# Altium footprint library IC.PcbLib: 204 footprints (part 8 of 13)
Each footprint in its own frame and in the unit in brackets; x right, y up, seen from the top. Pads: shape width x height; smd on the part's side, far side on the other; paste and mask are expansions set on the pad; w line width, h text height; cw(c..) or ccw(c..) is an arc to the next point about the centre after c.
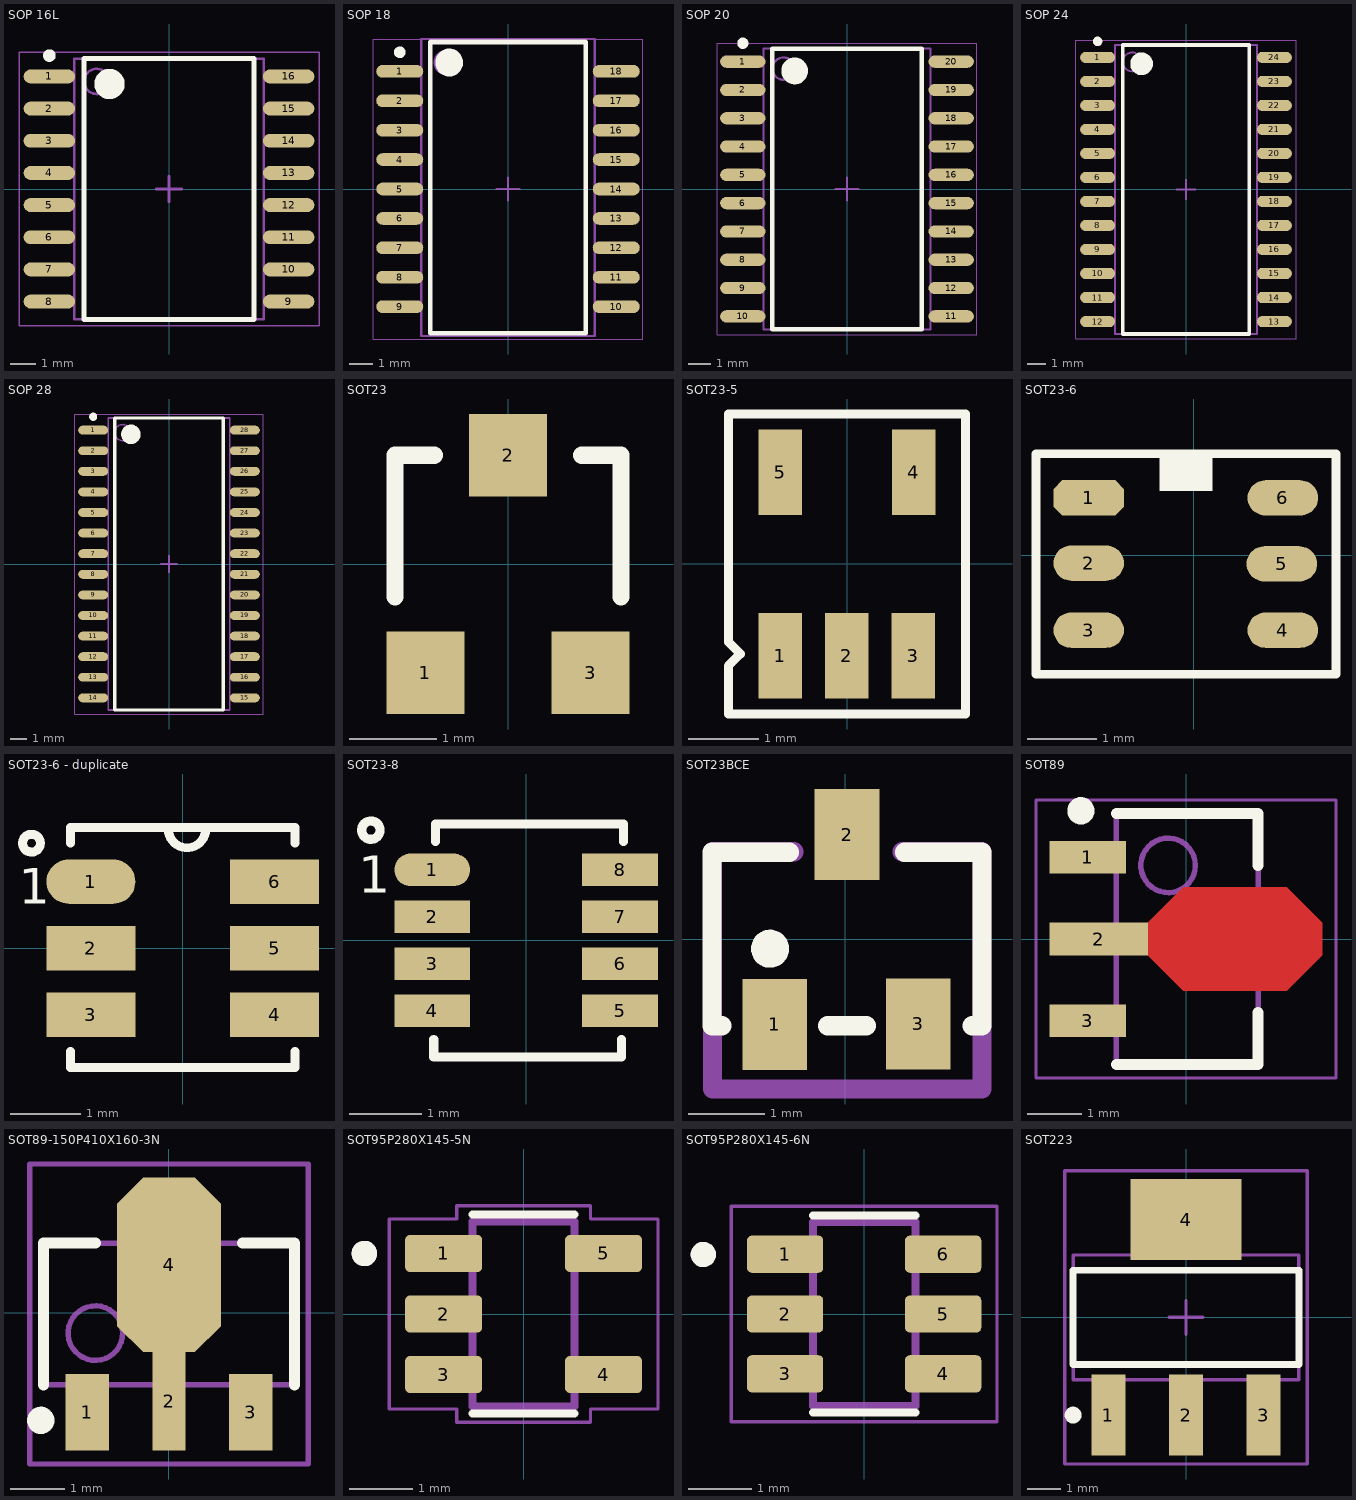
[diagram p7: the footprints below, top view; thin cyan lines are the x and y axes]

## SOP 16L [mm] "SOIC, 16-Leads, Body 10.30x7.50mm, Pitch 1.27mm, IPC Medium Density"
height 2.4
pads (16):
  oval 2.032x0.55 smd: 1(-4.725,4.445) 2(-4.725,3.175) 3(-4.725,1.905) 4(-4.725,0.635) 5(-4.725,-0.635) 6(-4.725,-1.905) 7(-4.725,-3.175) 8(-4.725,-4.445) 9(4.725,-4.445) 10(4.725,-3.175) 11(4.725,-1.905) 12(4.725,-0.635) 13(4.725,0.635) 14(4.725,1.905) 15(4.725,3.175) 16(4.725,4.445)
Top Overlay:
  circle w0.25: c-4.725,5.27 r0.125
  circle w0.6: c-2.35,4.15 r0.3
  lines w0.2: -3.35,-5.15 -3.35,5.15 3.35,5.15 3.35,-5.15 -3.35,-5.15
Mechanical 13:
  circle w0.1: c-2.85,4.25 r0.5
  lines w0.1: -3.75,-5.15 -3.75,5.15 3.75,5.15 3.75,-5.15 -3.75,-5.15
Mechanical 15:
  lines w0.05: -5.925,-5.4 -5.925,5.4 5.925,5.4 5.925,-5.4 -5.925,-5.4
  lines w0.1: -0.5,0 0.5,0 ; 0,-0.5 0,0.5
3D body "User Library-SO-16W.STEP": height 2.48, standoff 0, extent -5.155,-5.165 5.155,5.165

## SOP 18 [mm] "SOIC, 18-Leads, Body 11.50x7.50mm, Pitch 1.27mm, IPC Medium Density"
height 2.3
pads (18):
  oval 2.032x0.55 smd: 1(-4.675,5.08) 2(-4.675,3.81) 3(-4.675,2.54) 4(-4.675,1.27) 5(-4.675,0) 6(-4.675,-1.27) 7(-4.675,-2.54) 8(-4.675,-3.81) 9(-4.675,-5.08) 10(4.675,-5.08) 11(4.675,-3.81) 12(4.675,-2.54) 13(4.675,-1.27) 14(4.675,0) 15(4.675,1.27) 16(4.675,2.54) 17(4.675,3.81) 18(4.675,5.08)
Top Overlay:
  circle w0.25: c-4.675,5.905 r0.125
  circle w0.6: c-2.54,5.461 r0.3
  lines w0.2: -3.35,-6.223 -3.35,6.35 3.35,6.35 3.35,-6.223 -3.35,-6.223
Mechanical 13:
  circle w0.1: c-2.667,5.461 r0.5
  lines w0.1: -3.75,-6.35 -3.75,6.477 3.75,6.477 3.75,-6.35 -3.75,-6.35
Mechanical 15:
  lines w0.05: -5.825,-6.477 -5.825,6.477 5.825,6.477 5.825,-6.477 -5.825,-6.477
  lines w0.1: -0.5,0 0.5,0 ; 0,-0.5 0,0.5
3D body "User Library-SOIC18-300.step": height 2.7, standoff 0.05, extent -5.15,-5.765 5.15,5.765

## SOP 20 [mm] "SOIC, 20-Leads, Body 12.60x7.50mm, Pitch 1.27mm, IPC Medium Density"
height 2.65
pads (20):
  oval 2.032x0.55 smd: 1(-4.675,5.715) 2(-4.675,4.445) 3(-4.675,3.175) 4(-4.675,1.905) 5(-4.675,0.635) 6(-4.675,-0.635) 7(-4.675,-1.905) 8(-4.675,-3.175) 9(-4.675,-4.445) 10(-4.675,-5.715) 11(4.675,-5.715) 12(4.675,-4.445) 13(4.675,-3.175) 14(4.675,-1.905) 15(4.675,-0.635) 16(4.675,0.635) 17(4.675,1.905) 18(4.675,3.175) 19(4.675,4.445) 20(4.675,5.715)
Top Overlay:
  circle w0.6: c-2.35,5.3 r0.3
  circle w0.25: c-4.675,6.54 r0.125
  lines w0.2: -3.35,-6.3 3.35,-6.3 3.35,6.3 -3.35,6.3 -3.35,-6.3
Mechanical 13:
  circle w0.1: c-2.85,5.4 r0.5
  lines w0.1: -3.75,-6.3 3.75,-6.3 3.75,6.3 -3.75,6.3 -3.75,-6.3
Mechanical 15:
  lines w0.05: -5.825,-6.55 5.825,-6.55 5.825,6.55 -5.825,6.55 -5.825,-6.55
  lines w0.1: -0.5,0 0.5,0 ; 0,-0.5 0,0.5
3D body "User Library-SOIC20.step": height 2.25, standoff 0.01, extent -5.067,-6.3 5.067,6.3

## SOP 24 [mm] "SOIC, 24-Leads, Body 15.30x7.50mm, Pitch 1.27mm, IPC Medium Density"
height 2.3
pads (24):
  oval 1.85x0.6 smd: 1(-4.675,6.985) 2(-4.675,5.715) 3(-4.675,4.445) 4(-4.675,3.175) 5(-4.675,1.905) 6(-4.675,0.635) 7(-4.675,-0.635) 8(-4.675,-1.905) 9(-4.675,-3.175) 10(-4.675,-4.445) 11(-4.675,-5.715) 12(-4.675,-6.985) 13(4.675,-6.985) 14(4.675,-5.715) 15(4.675,-4.445) 16(4.675,-3.175) 17(4.675,-1.905) 18(4.675,-0.635) 19(4.675,0.635) 20(4.675,1.905) 21(4.675,3.175) 22(4.675,4.445) 23(4.675,5.715) 24(4.675,6.985)
Top Overlay:
  circle w0.25: c-4.675,7.835 r0.125
  circle w0.6: c-2.35,6.65 r0.3
  lines w0.2: -3.35,-7.65 -3.35,7.65 3.35,7.65 3.35,-7.65 -3.35,-7.65
Mechanical 13:
  circle w0.1: c-2.85,6.75 r0.5
  lines w0.1: -3.75,-7.65 -3.75,7.65 3.75,7.65 3.75,-7.65 -3.75,-7.65
Mechanical 15:
  lines w0.05: -5.825,-7.9 -5.825,7.9 5.825,7.9 5.825,-7.9 -5.825,-7.9
  lines w0.1: -0.5,0 0.5,0 ; 0,-0.5 0,0.5
3D body "User Library-SOIC_24.STEP": height 2.6, standoff 0, extent -5.2,-7.835 5.2,7.565

## SOP 28 [mm] "SOIC, 28-Leads, Body 18.00x7.50mm, Pitch 1.27mm, IPC Medium Density"
height 2.3
pads (28):
  oval 1.85x0.55 smd: 1(-4.675,8.255) 2(-4.675,6.985) 3(-4.675,5.715) 4(-4.675,4.445) 5(-4.675,3.175) 6(-4.675,1.905) 7(-4.675,0.635) 8(-4.675,-0.635) 9(-4.675,-1.905) 10(-4.675,-3.175) 11(-4.675,-4.445) 12(-4.675,-5.715) 13(-4.675,-6.985) 14(-4.675,-8.255) 15(4.675,-8.255) 16(4.675,-6.985) 17(4.675,-5.715) 18(4.675,-4.445) 19(4.675,-3.175) 20(4.675,-1.905) 21(4.675,-0.635) 22(4.675,0.635) 23(4.675,1.905) 24(4.675,3.175) 25(4.675,4.445) 26(4.675,5.715) 27(4.675,6.985) 28(4.675,8.255)
Top Overlay:
  circle w0.6: c-2.35,8 r0.3
  circle w0.25: c-4.675,9.08 r0.125
  lines w0.2: -3.35,-9 3.35,-9 3.35,9 -3.35,9 -3.35,-9
Mechanical 13:
  circle w0.1: c-2.85,8.1 r0.5
  lines w0.1: -3.75,-9 3.75,-9 3.75,9 -3.75,9 -3.75,-9
Mechanical 15:
  lines w0.05: -5.825,-9.25 5.825,-9.25 5.825,9.25 -5.825,9.25 -5.825,-9.25
  lines w0.1: -0.5,0 0.5,0 ; 0,-0.5 0,0.5
3D body "User Library-28-SOIC.step": height 2.73, standoff -0.03, extent -5.023,-9.01 5.277,8.89

## SOT23 [mm] "SOT23"
height 1.1
pads (3):
  rect 0.9x0.95 smd: 1(-0.95,-1.25) 2(0,1.25)
  rect 0.9x0.95 smd mask+0: 3(0.95,-1.25)
Top Overlay:
  lines w0.2: -1.3,-0.375 -1.3,1.25 -0.85,1.25 ; 0.85,1.25 1.3,1.25 1.3,-0.375
3D body "SW3DPS-SOT-23-DEFAULT.STEP": height 1.06, standoff -0.04, extent -1.524,-1.23 1.476,1.27

## SOT23-5 [mm] "CASE: SOT"
height 1.1
pads (5):
  rect 0.62x1.22 smd mask+0.076: 1(-0.953,-1.31) 2(-0.003,-1.31) 3(0.947,-1.31) 4(0.952,1.31) 5(-0.953,1.31)
Top Overlay:
  lines w0.127: -1.689,-2.138 -1.689,-1.452 -1.519,-1.281 -1.689,-1.111 -1.689,2.137 1.689,2.137 1.689,-2.138 -1.689,-2.138
3D body "User Library-SOT-23-5.STEP": height 1.41, standoff -0.05, extent -1.5,-1.5 1.5,1.5

## SOT23-6 [mil]
pads (6):
  oct 40x20 smd: 1(-59.41,32.4)
  oval 40x20 smd: 2(-59.41,-4.6) 3(-59.41,-42.6) 4(50.59,-42.6) 5(50,-5) 6(50.59,32.4)
Top Overlay:
  rectangle: -19.41,36.34 10.59,56.02
  lines w5: -89.29,43.42 -89.29,44.42 ; -89.29,47.42 -89.29,57.42 ; -75.29,57.42 -73.29,57.42 ; -74.29,57.42 -89.29,57.42 ; -89.29,57.42 -89.29,-67.58 80.71,-67.58 80.71,57.42 -89.29,57.42
3D body "User Library-SOT23-6.step": height 51.18, standoff 0, extent -64.05,-64.05 54.06,54.06

## SOT23-6 - duplicate [mm] "CASE: SOT"
height 1.45
pads (6):
  oval 1.27x0.635 smd mask+0.076: 1(-1.31,0.95)
  rect 1.27x0.635 smd mask+0.076: 2(-1.31,0) 3(-1.31,-0.95) 4(1.31,-0.95) 5(1.31,0) 6(1.31,0.95)
Top Overlay:
  circle w0.127: c-2.159,1.499 r0.127
  lines w0.127: -1.6,-1.473 -1.6,-1.704 1.6,-1.704 1.6,-1.473 ; -1.6,1.499 -1.6,1.725 1.6,1.725 1.6,1.499 ; -0.206,1.7 ccw(c0.061,1.7) 0.328,1.7
  text "1" at -2.337,0.635 h0.51
3D body "User Library-SOT-23-6-1.STEP": height 1.41, standoff -0.05, extent -1.5,-1.5 1.5,1.5

## SOT23-8 [mm] "Case-SOT"
height 1.45
pads (8):
  oval 1.05x0.45 smd mask+0.076: 1(-1.3,0.975)
  rect 1.05x0.45 smd mask+0.076: 2(-1.3,0.325) 3(-1.3,-0.325) 4(-1.3,-0.975) 5(1.3,-0.975) 6(1.3,-0.325) 7(1.3,0.325) 8(1.3,0.975)
Top Overlay:
  circle w0.127: c-2.149,1.524 r0.127
  lines w0.127: -1.279,-1.372 -1.279,-1.616 1.321,-1.616 1.321,-1.372 ; -1.254,1.366 -1.254,1.61 1.346,1.61 1.346,1.366
  text "1" at -2.327,0.66 h0.51
3D body "User Library-SOT-23-8-Thin.step": height 1.1, standoff 0, extent -1.454,-1.465 1.496,1.485

## SOT23BCE [mm]
pads (3):
  rect 0.85x1.2 smd: 1(-0.927,-1.123) 2(0.023,1.377) 3(0.963,-1.118)
Top Overlay:
  circle w0.25: c-0.991,-0.127 r0.125
  lines w0.254: -1.628,-1.143 -1.755,-1.143 -1.755,1.143 -0.739,1.143 ; -0.231,-1.143 0.277,-1.143 ; 0.785,1.143 1.801,1.143 1.801,-1.143 1.674,-1.143
Mechanical 13:
  lines w0.254: -0.675,1.15 -1.75,1.15 -1.75,-1.975 1.8,-1.975 1.8,1.15 0.75,1.15
  text "E" at 0.9,-0.25 h0.64
  text "C" at -0.1,0 h0.64
3D body "SW3DPS-SOT-23-DEFAULT.STEP": height 1.06, standoff -0.04, extent -1.477,-1.174 1.523,1.326

## SOT89 [mm] "SOT89, 3-Leads, Body 4.55x2.55mm, Pitch 1.50mm, Lead Span 4.1mm, IPC Medium Density"
height 1.5
pads (3):
  rect 1.4x0.6 smd: 1(-1.8,1.5) 3(-1.8,-1.5)
  rect 1.8x0.6 smd: 2(-1.6,0)
Top Layer:
  region: -0.7,0.3 -0.05,0.95 1.85,0.95 2.5,0.3 2.5,-0.3 1.85,-0.95 -0.05,-0.95 -0.7,-0.3
Top Overlay:
  circle w0.25: c-1.927,2.35 r0.125
  lines w0.2: -1.278,-2.3 1.322,-2.3 1.322,-1.35 ; -1.278,2.3 1.322,2.3 1.322,1.35
Mechanical 13:
  circle w0.1: c-0.327,1.35 r0.5
  lines w0.1: -1.278,-2.3 1.322,-2.3 1.322,2.3 -1.278,2.3 -1.278,-2.3
Mechanical 15:
  lines w0.05: -2.75,-2.55 2.75,-2.55 2.75,2.55 -2.75,2.55 -2.75,-2.55
  lines w0.1: -0.477,0 0.523,0 ; 0.022,-0.5 0.022,0.5
3D body "CircuitWorks-SOT89.step": height 1.5, standoff 0, extent -2.159,-2.25 1.841,2.25

## SOT89-150P410X160-3N [mm]
pads (4):
  rect 0.8x1.4 smd: 1(-1.5,-1.825) 3(1.5,-1.825)
  rect 0.6x1.8 smd: 2(0,-1.625)
  oct 1.9x3.2 smd: 4(0,0.875)
Top Overlay:
  circle w0.25: c-2.35,-1.975 r0.125
  lines w0.2: -2.3,-1.325 -2.3,1.275 -1.35,1.275 ; 1.35,1.275 2.3,1.275 2.3,-1.325
Mechanical 13:
  circle w0.1: c-1.35,-0.375 r0.5
  lines w0.1: -2.3,-1.325 2.3,-1.325 2.3,1.275 -2.3,1.275 -2.3,-1.325
Mechanical 15:
  lines w0.1: -0.5,-0.025 0.5,-0.025 ; 0,-0.525 0,0.475 ; -2.55,-2.775 2.55,-2.775 2.55,2.725 -2.55,2.725 -2.55,-2.775
3D body "sot89.step": height 1.4, standoff 0, extent -2.25,-2.21 2.25,1.725

## SOT95P280X145-5N [mm]
height 1.45
pads (5):
  rrect25% 1.21x0.58 smd paste+0 mask+0.102: 1(-1.255,0.95) 2(-1.255,0) 3(-1.255,-0.95) 4(1.255,-0.95) 5(1.255,0.95)
Top Overlay:
  circle w0.2: c-2.5,0.95 r0.1
  lines w0.127: -0.8,-1.56 0.8,-1.56 ; -0.8,1.56 0.8,1.56
Mechanical 13:
  circle w0.2: c-2.5,0.95 r0.1
  lines w0.127: -0.8,-1.45 -0.8,1.45 0.8,1.45 0.8,-1.45 -0.8,-1.45
Mechanical 15:
  lines w0.05: -2.11,-1.49 -2.11,1.49 -1.05,1.49 -1.05,1.7 1.05,1.7 1.05,1.49 2.11,1.49 2.11,-1.49 1.05,-1.49 1.05,-1.7 -1.05,-1.7 -1.05,-1.49 -2.11,-1.49
3D body "step_temp.STEP": height 1.45, standoff 0, extent -1.4,-1.45 1.4,1.45

## SOT95P280X145-6N [mm]
pads (6):
  rrect25% 1.21x0.59 smd: 1(-1.255,0.95) 2(-1.255,0) 3(-1.255,-0.95) 4(1.255,-0.95) 5(1.255,0) 6(1.255,0.95)
Top Overlay:
  circle w0.2: c-2.555,0.945 r0.1
  lines w0.127: -0.813,-1.565 0.813,-1.565 ; -0.813,1.565 0.813,1.565
Mechanical 13:
  circle w0.2: c-2.555,0.945 r0.1
  lines w0.127: -0.813,-1.462 0.813,-1.462 0.813,1.462 -0.813,1.462 -0.813,-1.462
Mechanical 15:
  lines w0.05: -2.11,-1.713 -2.11,1.713 2.11,1.713 2.11,-1.713 -2.11,-1.713
3D body "step_temp.STEP": height 1.4, standoff -0.05, extent -1.4,-1.462 1.4,1.462

## SOT223 [mm]
pads (4):
  rect 1x2.4 smd: 1(-2.3,-2.9) 2(0,-2.9) 3(2.3,-2.9)
  rect 3.3x2.4 smd: 4(0,2.9)
Top Overlay:
  circle w0.25: c-3.35,-2.9 r0.125
  lines w0.2: -3.35,-1.4 -3.35,1.4 3.35,1.4 3.35,-1.4 -3.35,-1.4
Mechanical 13:
  lines w0.1: -3.35,-1.85 -3.35,1.85 3.35,1.85 3.35,-1.85 -3.35,-1.85
Mechanical 15:
  lines w0.1: -0.5,0 0.5,0 ; 0,-0.5 0,0.5 ; -3.6,-4.35 -3.6,4.35 3.6,4.35 3.6,-4.35 -3.6,-4.35
3D body "SW3DPS-SOT-223-DEFAULT.step": height 1.68, standoff 0, extent -3.25,-3.556 3.25,3.404